# Altium schematic symbol library Stepper Base Schlib.SchLib: 3 symbols
Pins are listed as number, name and electrical type; pins without a type are passive.

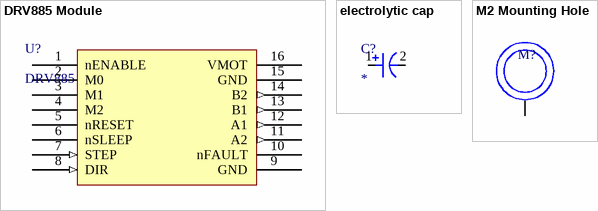
[diagram p0: symbols DRV885 Module to M2 Mounting Hole]

## DRV885 Module
designator U?, comment DRV885
footprint DRV588
pins: 1 nENABLE, 2 M0, 3 M1, 4 M2, 5 nRESET, 6 nSLEEP, 7 STEP (in), 8 DIR (in), 9 GND (power), 10 nFAULT, 11 A2 (out), 12 A1 (out), 13 B1 (out), 14 B2 (out), 15 GND (power), 16 VMOT (power)

## electrolytic cap
designator C?
footprint electrolytic cap
pins: 1, 2

## M2 Mounting Hole
designator M?  (value not drawn)
footprint M2 Mounting Hole
pins: 1